# EAGLE library part NRF24 (library c64-tx)
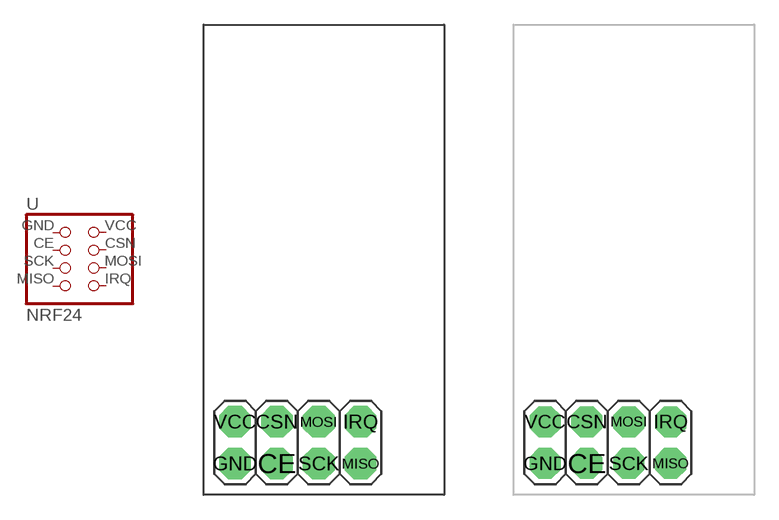
[diagram p5: symbol with the pads of NRF24; footprints NRF24, NRF24-PCB]

Designator prefix -

## NRF24  [NRF24]
CE  CE  pas
CSN  CSN  pas
GND  GND  pas
IRQ  IRQ  pas
MISO  MISO  pas
MOSI  MOSI  pas
SCK  SCK  pas
VCC  VCC  pas

## NRF24PCBPAD  [NRF24-PCB]
Pads as for NRF24

## Footprint NRF24 (pad centres in mm)
drill 0.9 pad 1.93 octagon: CE 3.81,-1.27; CSN 3.81,1.27; GND 1.27,-1.27; IRQ 8.89,1.27; MISO 8.89,-1.27; MOSI 6.35,1.27; SCK 6.35,-1.27; VCC 1.27,1.27

## Footprint NRF24-PCB (pad centres in mm)
drill 1.016 pad 1.88 octagon: CE 3.81,-1.27; CSN 3.81,1.27; GND 1.27,-1.27; IRQ 8.89,1.27; MISO 8.89,-1.27; MOSI 6.35,1.27; SCK 6.35,-1.27; VCC 1.27,1.27